# Altium integrated library DW01P.IntLib: 1 symbol
Pins are listed as number, name and electrical type; pins without a type are passive.

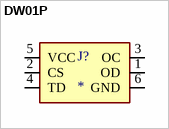
[diagram p0: symbol DW01P]

## DW01P
designator J?
One Cell Lithium-ion/Polymer Battery Protection IC; MF: Fortune; MP: DW01-P; SnapEDA_Link: https://www.snapeda.com/parts/DW01-P/Fortune+Semiconductor/view-part/?ref=snap; Package: None; Value: *; Check_prices: https://www.snapeda.com/parts/DW01-P/Fortune+Semiconductor/view-part/?ref=eda
footprint SOT23-6
pins: 1 OD (io), 2 CS (io), 3 OC (io), 4 TD (io), 5 VCC (io), 6 GND (io)